# Altium footprint library ProjectFootprints-20261027_001106_796.PcbLib: 50 footprints (part 4 of 4)
Each footprint in its own frame and in the unit in brackets; x right, y up, seen from the top. Pads: shape width x height; smd on the part's side, far side on the other; paste and mask are expansions set on the pad; w line width, h text height; cw(c..) or ccw(c..) is an arc to the next point about the centre after c.
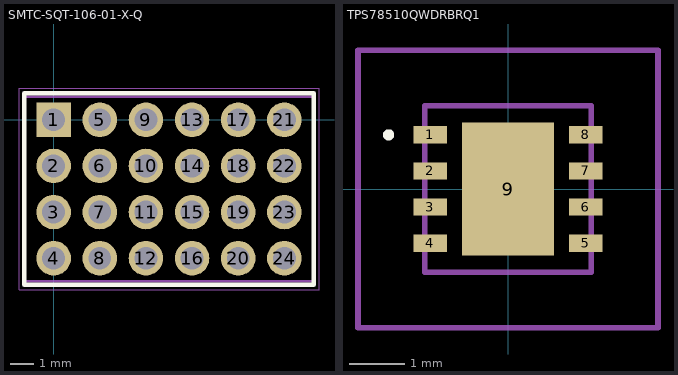
[diagram p3: the footprints below, top view; thin cyan lines are the x and y axes]

## SMTC-SQT-106-01-X-Q [mm] "Socket Strip Assembly, 4x6 Pins, Vertical, 2mm Pitch, Female"
height 6.35
pads (24):
  rect 1.5x1.5 hole 0.99: 1(0,0)
  round 1.5 hole 0.99: 2(0,-2) 3(0,-4) 4(0,-6) 5(2,0) 6(2,-2) 7(2,-4) 8(2,-6) 9(4,0) 10(4,-2) 11(4,-4) 12(4,-6) 13(6,0) 14(6,-2) 15(6,-4) 16(6,-6) 17(8,0) 18(8,-2) 19(8,-4) 20(8,-6) 21(10,0) 22(10,-2) 23(10,-4) 24(10,-6)
Top Overlay:
  lines w0.2: -1.275,-7.15 -1.275,1.15 11.275,1.15 11.275,-7.15 -1.275,-7.15
Top 3D Body:
  lines w0.1: -1.275,-7 -1.275,1 11.275,1 11.275,-7 -1.275,-7
Top Courtyard:
  lines w0.05: -1.5,-7.375 -1.5,1.375 11.5,1.375 11.5,-7.375 -1.5,-7.375
3D body "SQT-106-01-X-Q.step": height 6.35, standoff -2.29, extent -1.149,-7 11.148,1

## TPS78510QWDRBRQ1 [mm]
pads (9):
  rect 0.6x0.31 smd: 1(-1.4,0.975) 2(-1.4,0.325) 3(-1.4,-0.325) 4(-1.4,-0.975) 5(1.4,-0.975) 6(1.4,-0.325) 7(1.4,0.325) 8(1.4,0.975)
  rect 1.65x2.4 smd: 9(0,0)
Top Overlay:
  lines w0.1: -2.2,0.975 cw(c-2.15,0.975) -2.1,0.975 cw(c-2.15,0.975) -2.2,0.975
Top 3D Body:
  lines w0.1: -1.5,-1.5 -1.5,1.5 1.5,1.5 1.5,-1.5 -1.5,-1.5
Top Courtyard:
  lines w0.1: -2.7,-2.5 -2.7,2.5 2.7,2.5 2.7,-2.5 -2.7,-2.5
3D body "TPS78510QWDRBRQ1.stp": height 1.1, standoff 0, extent -1.5,-1.5 1.5,1.5